# Altium schematic symbol library LIS3MDL.SchLib: 1 symbol
Pins are listed as number, name and electrical type; pins without a type are passive.

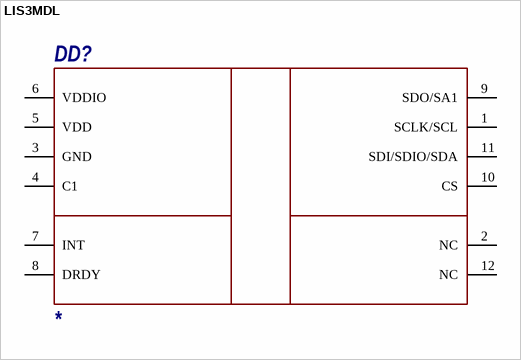
[diagram p0: symbol LIS3MDL]

## LIS3MDL
designator DD?
pins: 1 SCLK/SCL, 2 NC, 3 GND, 4 C1, 5 VDD, 6 VDDIO, 7 INT, 8 DRDY, 9 SDO/SA1, 10 CS, 11 SDI/SDIO/SDA, 12 NC